# Altium footprint library WE-PD2_5848.PcbLib: 1 footprints
Each footprint in its own frame and in the unit in brackets; x right, y up, seen from the top. Pads: shape width x height; smd on the part's side, far side on the other; paste and mask are expansions set on the pad; w line width, h text height; cw(c..) or ccw(c..) is an arc to the next point about the centre after c.
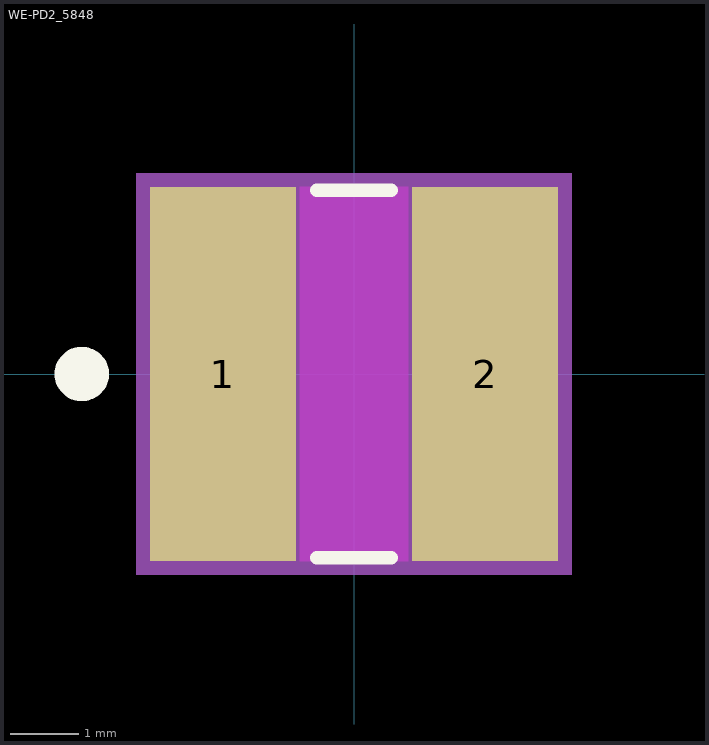
[diagram p0: the footprint, top view; thin cyan lines are the x and y axes]

## WE-PD2_5848 [mm]
pads (2):
  rect 2.15x5.5 smd paste+0 mask+0.102: 1(-1.925,0) 2(1.925,0)
Top Overlay:
  circle w0.4: c-4,0 r0.2
  lines w0.2: -0.55,-2.7 0.55,-2.7 ; -0.55,2.7 0.55,2.7
Keep-Out Layer:
  region: 0.8,-2.75 -0.8,-2.75 -0.8,2.75 0.8,2.75
Assembly Top:
  lines w0.1: -1.29,-2.6 1.28,-2.6 1.56,-2.45 ; -1.28,-2.6 -1.38,-2.55 -1.58,-2.43 -1.75,-2.31 -1.98,-2.12 -2.15,-1.95 -2.32,-1.75 -2.46,-1.53 -2.58,-1.32 -2.7,-1.06 -2.79,-0.79 -2.86,-0.5 -2.9,-0.2 -2.9,0.05 -2.88,0.35 -2.82,0.7 -2.74,0.97 -2.59,1.31 -2.42,1.6 -2.24,1.84 -1.98,2.11 -1.74,2.32 -1.53,2.47 -1.44,2.53 -1.29,2.6 1.29,2.6 1.39,2.56 1.55,2.45 1.75,2.31 1.94,2.15 2.14,1.97 2.33,1.72 2.51,1.45 2.65,1.17 2.77,0.88 2.86,0.49 2.9,0.05 2.88,-0.36 2.81,-0.72 2.71,-1.04 2.55,-1.39 2.34,-1.71 2.11,-1.99 1.84,-2.25 1.54,-2.46
Courtyard Top:
  region: 3.2,-2.95 -3.2,-2.95 -3.2,2.95 3.2,2.95
3D body "step_temp.STEP": height 2.6, standoff -2.6, extent -2.889,-4.5 2.899,0